# Altium footprint library Miscellaneous Connectors.PcbLib: 245 footprints (part 8 of 16)
Each footprint in its own frame and in the unit in brackets; x right, y up, seen from the top. Pads: shape width x height; smd on the part's side, far side on the other; paste and mask are expansions set on the pad; w line width, h text height; cw(c..) or ccw(c..) is an arc to the next point about the centre after c.
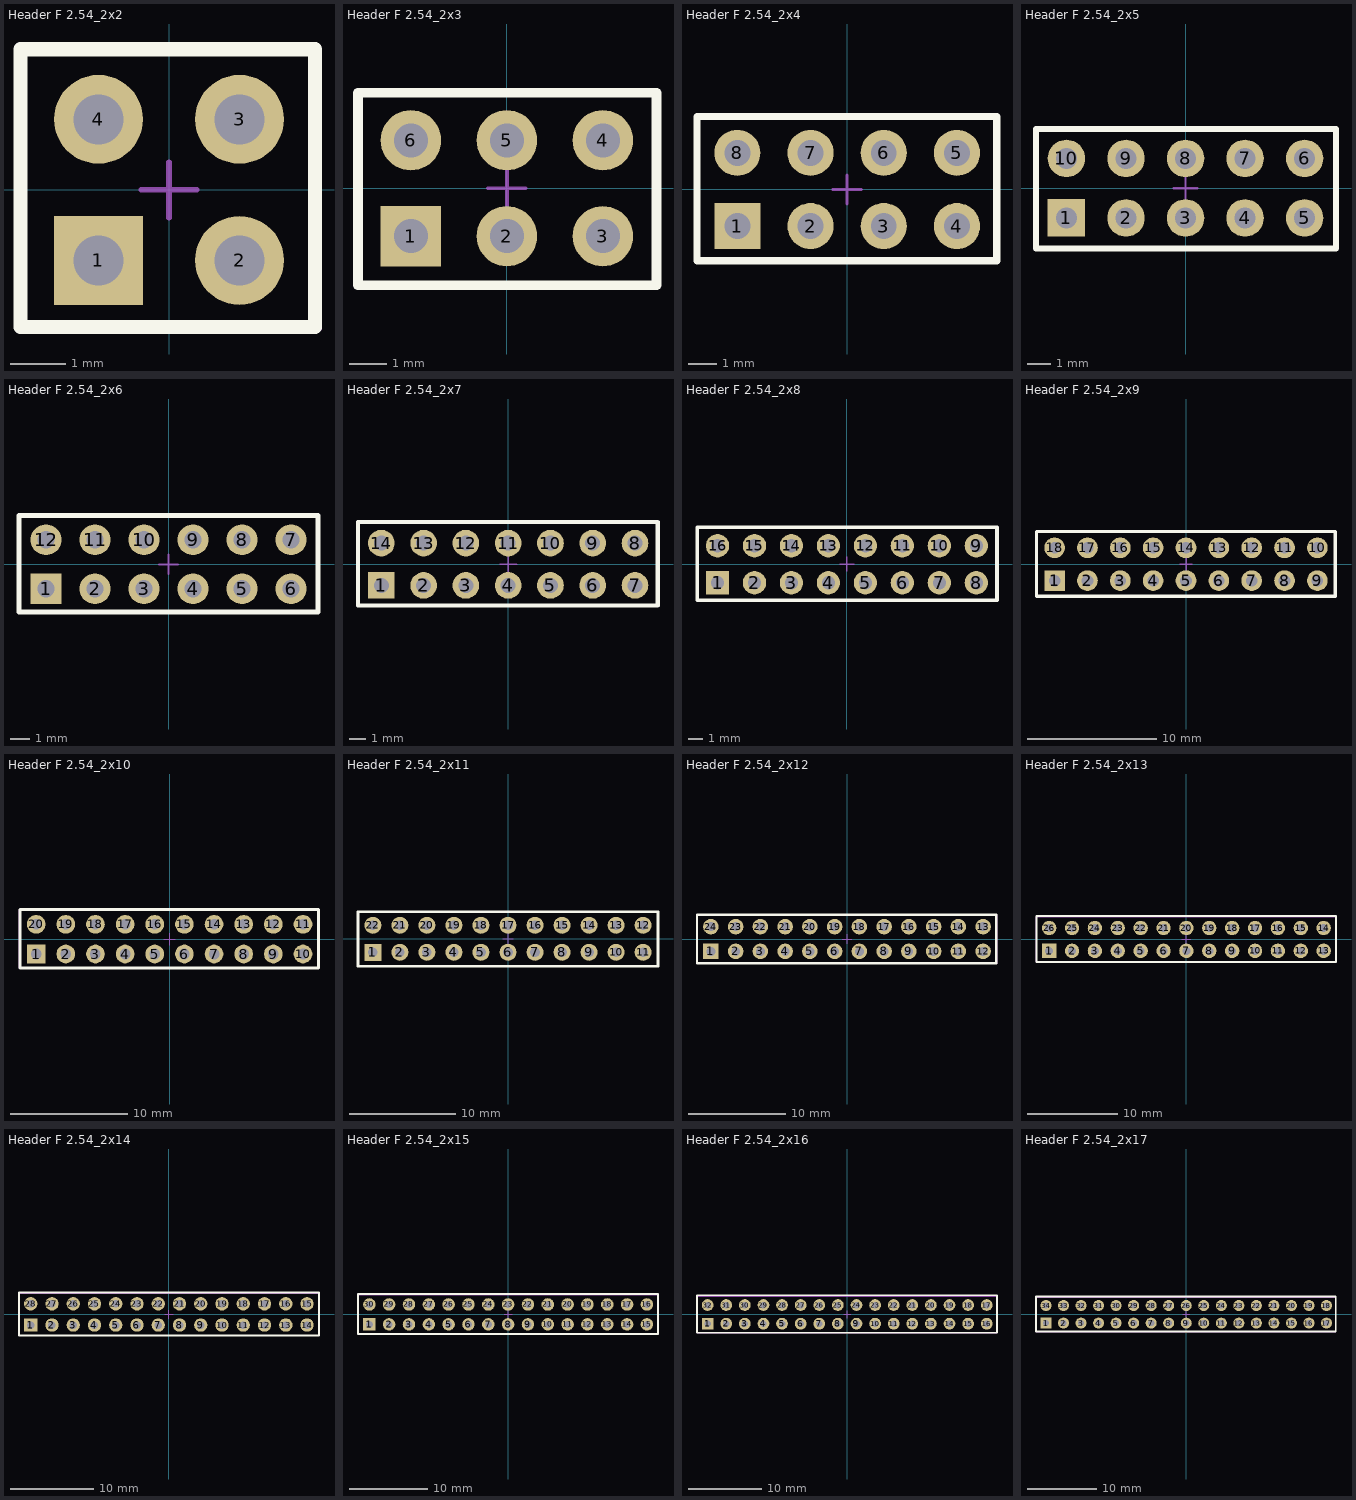
[diagram p7: the footprints below, top view; thin cyan lines are the x and y axes]

## Header F 2.54_2x2 [mm]
pads (4):
  rect 1.6x1.6 hole 0.9: 1(-1.27,-1.27)
  round 1.6 hole 0.9: 2(1.27,-1.27) 3(1.27,1.27) 4(-1.27,1.27)
Top Overlay:
  lines w0.254: -2.67,-2.47 2.63,-2.47 2.63,2.53 -2.67,2.53 -2.67,-2.47
Mechanical 15:
  lines w0.1: -0.5,0 0.5,0 ; 0,-0.5 0,0.5 ; -2.7,-2.5 2.7,-2.5 2.7,2.5 -2.7,2.5 -2.7,-2.5
3D body: height 8.6, standoff -3.1, extent -2.67,-2.47 2.66,2.53

## Header F 2.54_2x3 [mm]
pads (6):
  rect 1.6x1.6 hole 0.9: 1(-2.54,-1.27)
  round 1.6 hole 0.9: 2(0,-1.27) 3(2.54,-1.27) 4(2.54,1.27) 5(0,1.27) 6(-2.54,1.27)
Top Overlay:
  lines w0.254: -3.94,-2.57 3.96,-2.57 3.96,2.53 -3.94,2.53 -3.94,-2.57
Mechanical 15:
  lines w0.1: -0.5,0 0.5,0 ; 0,-0.5 0,0.5 ; -3.9,-2.5 -3.9,2.5 4,2.5 4,-2.5 -3.9,-2.5
3D body: height 8.6, standoff -3.1, extent -3.91,-2.5 3.96,2.5

## Header F 2.54_2x4 [mm]
pads (8):
  rect 1.6x1.6 hole 0.9: 1(-3.81,-1.27)
  round 1.6 hole 0.9: 2(-1.27,-1.27) 3(1.27,-1.27) 4(3.81,-1.27) 5(3.81,1.27) 6(1.27,1.27) 7(-1.27,1.27) 8(-3.81,1.27)
Top Overlay:
  lines w0.254: -5.21,-2.47 5.19,-2.47 5.19,2.53 -5.21,2.53 -5.21,-2.47
Mechanical 15:
  lines w0.1: -0.5,0 0.5,0 ; 0,-0.5 0,0.5 ; -5.2,-2.5 5.2,-2.5 5.2,2.5 -5.2,2.5 -5.2,-2.5
3D body: height 8.6, standoff -3.1, extent -5.21,-2.47 5.2,2.53

## Header F 2.54_2x5 [mm]
pads (10):
  rect 1.6x1.6 hole 0.9: 1(-5.08,-1.27)
  round 1.6 hole 0.9: 2(-2.54,-1.27) 3(0,-1.27) 4(2.54,-1.27) 5(5.08,-1.27) 6(5.08,1.27) 7(2.54,1.27) 8(0,1.27) 9(-2.54,1.27) 10(-5.08,1.27)
Top Overlay:
  lines w0.254: -6.38,-2.57 6.42,-2.57 6.42,2.53 -6.38,2.53 -6.38,-2.57
Mechanical 15:
  lines w0.1: -0.5,0 0.5,0 ; 0,-0.5 0,0.5 ; -6.3,-2.6 6.4,-2.6 6.4,2.5 -6.3,2.5 -6.3,-2.6
3D body: height 8.6, standoff -2.9, extent -6.33,-2.55 6.37,2.53

## Header F 2.54_2x6 [mm]
pads (12):
  rect 1.6x1.6 hole 0.9: 1(-6.35,-1.27)
  round 1.6 hole 0.9: 2(-3.81,-1.27) 3(-1.27,-1.27) 4(1.27,-1.27) 5(3.81,-1.27) 6(6.35,-1.27) 7(6.35,1.27) 8(3.81,1.27) 9(1.27,1.27) 10(-1.27,1.27) 11(-3.81,1.27) 12(-6.35,1.27)
Top Overlay:
  lines w0.254: -7.75,-2.47 7.75,-2.47 7.75,2.53 -7.75,2.53 -7.75,-2.47
Mechanical 15:
  lines w0.1: -0.5,0 0.5,0 ; 0,-0.5 0,0.5 ; -7.7,-2.5 7.8,-2.5 7.8,2.5 -7.7,2.5 -7.7,-2.5
3D body: height 8.6, standoff -3.1, extent -7.72,-2.5 7.77,2.5

## Header F 2.54_2x7 [mm]
pads (14):
  rect 1.6x1.6 hole 0.9: 1(-7.62,-1.27)
  round 1.6 hole 0.9: 2(-5.08,-1.27) 3(-2.54,-1.27) 4(0,-1.27) 5(2.54,-1.27) 6(5.08,-1.27) 7(7.62,-1.27) 8(7.62,1.27) 9(5.08,1.27) 10(2.54,1.27) 11(0,1.27) 12(-2.54,1.27) 13(-5.08,1.27) 14(-7.62,1.27)
Top Overlay:
  lines w0.254: -9.02,-2.47 8.98,-2.47 8.98,2.53 -9.02,2.53 -9.02,-2.47
Mechanical 15:
  lines w0.1: -0.5,0 0.5,0 ; 0,-0.5 0,0.5 ; -9,-2.5 9,-2.5 9,2.5 -9,2.5 -9,-2.5
3D body: height 8.6, standoff -3.1, extent -9.02,-2.47 9.01,2.53

## Header F 2.54_2x8 [mm]
pads (16):
  rect 1.6x1.6 hole 0.9: 1(-8.89,-1.27)
  round 1.6 hole 0.9: 2(-6.35,-1.27) 3(-3.81,-1.27) 4(-1.27,-1.27) 5(1.27,-1.27) 6(3.81,-1.27) 7(6.35,-1.27) 8(8.89,-1.27) 9(8.89,1.27) 10(6.35,1.27) 11(3.81,1.27) 12(1.27,1.27) 13(-1.27,1.27) 14(-3.81,1.27) 15(-6.35,1.27) 16(-8.89,1.27)
Top Overlay:
  lines w0.254: -10.29,-2.47 10.31,-2.47 10.31,2.53 -10.29,2.53 -10.29,-2.47
Mechanical 15:
  lines w0.1: -0.5,0 0.5,0 ; 0,-0.5 0,0.5 ; -10.3,-2.5 10.3,-2.5 10.3,2.5 -10.3,2.5 -10.3,-2.5
3D body: height 8.6, standoff -3.1, extent -10.275,-2.47 10.295,2.53

## Header F 2.54_2x9 [mm]
pads (18):
  rect 1.6x1.6 hole 0.9: 1(-10.16,-1.27)
  round 1.6 hole 0.9: 2(-7.62,-1.27) 3(-5.08,-1.27) 4(-2.54,-1.27) 5(0,-1.27) 6(2.54,-1.27) 7(5.08,-1.27) 8(7.62,-1.27) 9(10.16,-1.27) 10(10.16,1.27) 11(7.62,1.27) 12(5.08,1.27) 13(2.54,1.27) 14(0,1.27) 15(-2.54,1.27) 16(-5.08,1.27) 17(-7.62,1.27) 18(-10.16,1.27)
Top Overlay:
  lines w0.254: -11.56,-2.47 11.54,-2.47 11.54,2.53 -11.56,2.53 -11.56,-2.47
Mechanical 15:
  lines w0.1: -0.5,0 0.5,0 ; 0,-0.5 0,0.5 ; -11.6,-2.5 11.6,-2.5 11.6,2.5 -11.6,2.5 -11.6,-2.5
3D body: height 8.6, standoff -3.1, extent -11.53,-2.5 11.58,2.5

## Header F 2.54_2x10 [mm]
pads (20):
  rect 1.6x1.6 hole 0.9: 1(-11.43,-1.27)
  round 1.6 hole 0.9: 2(-8.89,-1.27) 3(-6.35,-1.27) 4(-3.81,-1.27) 5(-1.27,-1.27) 6(1.27,-1.27) 7(3.81,-1.27) 8(6.35,-1.27) 9(8.89,-1.27) 10(11.43,-1.27) 11(11.43,1.27) 12(8.89,1.27) 13(6.35,1.27) 14(3.81,1.27) 15(1.27,1.27) 16(-1.27,1.27) 17(-3.81,1.27) 18(-6.35,1.27) 19(-8.89,1.27) 20(-11.43,1.27)
Top Overlay:
  lines w0.254: -12.83,-2.47 12.77,-2.47 12.77,2.53 -12.83,2.53 -12.83,-2.47
Mechanical 15:
  lines w0.1: -0.5,0 0.5,0 ; 0,-0.5 0,0.5 ; -12.9,-2.5 12.8,-2.5 12.8,2.5 -12.9,2.5 -12.9,-2.5
3D body: height 8.6, standoff -3.1, extent -12.855,-2.52 12.795,2.48

## Header F 2.54_2x11 [mm]
pads (22):
  rect 1.6x1.6 hole 0.9: 1(-12.7,-1.27)
  round 1.6 hole 0.9: 2(-10.16,-1.27) 3(-7.62,-1.27) 4(-5.08,-1.27) 5(-2.54,-1.27) 6(0,-1.27) 7(2.54,-1.27) 8(5.08,-1.27) 9(7.62,-1.27) 10(10.16,-1.27) 11(12.7,-1.27) 12(12.7,1.27) 13(10.16,1.27) 14(7.62,1.27) 15(5.08,1.27) 16(2.54,1.27) 17(0,1.27) 18(-2.54,1.27) 19(-5.08,1.27) 20(-7.62,1.27) 21(-10.16,1.27) 22(-12.7,1.27)
Top Overlay:
  lines w0.254: -14.1,-2.57 -14.1,2.53 14.1,2.53 14.1,-2.57 -14.1,-2.57
Mechanical 15:
  lines w0.1: -0.5,0 0.5,0 ; 0,-0.5 0,0.5 ; -14.1,-2.5 -14.1,2.5 14.1,2.5 14.1,-2.5 -14.1,-2.5
3D body: height 8.6, standoff -3.1, extent -14.12,-2.5 14.07,2.5

## Header F 2.54_2x12 [mm]
pads (24):
  rect 1.6x1.6 hole 0.9: 1(-13.97,-1.27)
  round 1.6 hole 0.9: 2(-11.43,-1.27) 3(-8.89,-1.27) 4(-6.35,-1.27) 5(-3.81,-1.27) 6(-1.27,-1.27) 7(1.27,-1.27) 8(3.81,-1.27) 9(6.35,-1.27) 10(8.89,-1.27) 11(11.43,-1.27) 12(13.97,-1.27) 13(13.97,1.27) 14(11.43,1.27) 15(8.89,1.27) 16(6.35,1.27) 17(3.81,1.27) 18(1.27,1.27) 19(-1.27,1.27) 20(-3.81,1.27) 21(-6.35,1.27) 22(-8.89,1.27) 23(-11.43,1.27) 24(-13.97,1.27)
Top Overlay:
  lines w0.254: -15.4,-2.5 15.3,-2.5 15.3,2.5 -15.4,2.5 -15.4,-2.5
Mechanical 15:
  lines w0.1: -0.5,0 0.5,0 ; 0,-0.5 0,0.5 ; -15.4,-2.5 15.4,-2.5 15.4,2.5 -15.4,2.5 -15.4,-2.5
3D body: height 8.6, standoff -3.1, extent -15.385,-2.47 15.345,2.53

## Header F 2.54_2x13 [mm]
pads (26):
  rect 1.6x1.6 hole 0.9: 1(-15.24,-1.27)
  round 1.6 hole 0.9: 2(-12.7,-1.27) 3(-10.16,-1.27) 4(-7.62,-1.27) 5(-5.08,-1.27) 6(-2.54,-1.27) 7(0,-1.27) 8(2.54,-1.27) 9(5.08,-1.27) 10(7.62,-1.27) 11(10.16,-1.27) 12(12.7,-1.27) 13(15.24,-1.27) 14(15.24,1.27) 15(12.7,1.27) 16(10.16,1.27) 17(7.62,1.27) 18(5.08,1.27) 19(2.54,1.27) 20(0,1.27) 21(-2.54,1.27) 22(-5.08,1.27) 23(-7.62,1.27) 24(-10.16,1.27) 25(-12.7,1.27) 26(-15.24,1.27)
Top Overlay:
  lines w0.254: -16.64,-2.5 16.61,-2.5 16.61,2.6 -16.64,2.6 -16.64,-2.5
Mechanical 15:
  lines w0.1: -0.5,0 0.5,0 ; 0,-0.5 0,0.5 ; -16.7,-2.5 16.6,-2.5 16.6,2.5 -16.7,2.5 -16.7,-2.5
3D body: height 8.6, standoff -3.1, extent -16.64,-2.47 16.63,2.53

## Header F 2.54_2x14 [mm]
pads (28):
  rect 1.6x1.6 hole 0.9: 1(-16.51,-1.27)
  round 1.6 hole 0.9: 2(-13.97,-1.27) 3(-11.43,-1.27) 4(-8.89,-1.27) 5(-6.35,-1.27) 6(-3.81,-1.27) 7(-1.27,-1.27) 8(1.27,-1.27) 9(3.81,-1.27) 10(6.35,-1.27) 11(8.89,-1.27) 12(11.43,-1.27) 13(13.97,-1.27) 14(16.51,-1.27) 15(16.51,1.27) 16(13.97,1.27) 17(11.43,1.27) 18(8.89,1.27) 19(6.35,1.27) 20(3.81,1.27) 21(1.27,1.27) 22(-1.27,1.27) 23(-3.81,1.27) 24(-6.35,1.27) 25(-8.89,1.27) 26(-11.43,1.27) 27(-13.97,1.27) 28(-16.51,1.27)
Top Overlay:
  lines w0.254: -17.91,-2.5 17.94,-2.5 17.94,2.6 -17.91,2.6 -17.91,-2.5
Mechanical 15:
  lines w0.1: -0.5,0 0.5,0 ; 0,-0.5 0,0.5 ; -17.9,-2.5 17.9,-2.5 17.9,2.5 -17.9,2.5 -17.9,-2.5
3D body: height 8.6, standoff -3.1, extent -17.915,-2.47 17.895,2.53

## Header F 2.54_2x15 [mm]
pads (30):
  rect 1.6x1.6 hole 0.9: 1(-17.78,-1.27)
  round 1.6 hole 0.9: 2(-15.24,-1.27) 3(-12.7,-1.27) 4(-10.16,-1.27) 5(-7.62,-1.27) 6(-5.08,-1.27) 7(-2.54,-1.27) 8(0,-1.27) 9(2.54,-1.27) 10(5.08,-1.27) 11(7.62,-1.27) 12(10.16,-1.27) 13(12.7,-1.27) 14(15.24,-1.27) 15(17.78,-1.27) 16(17.78,1.27) 17(15.24,1.27) 18(12.7,1.27) 19(10.16,1.27) 20(7.62,1.27) 21(5.08,1.27) 22(2.54,1.27) 23(0,1.27) 24(-2.54,1.27) 25(-5.08,1.27) 26(-7.62,1.27) 27(-10.16,1.27) 28(-12.7,1.27) 29(-15.24,1.27) 30(-17.78,1.27)
Top Overlay:
  lines w0.254: -19.23,-2.5 19.17,-2.5 19.17,2.6 -19.23,2.6 -19.23,-2.5
Mechanical 15:
  lines w0.1: -0.5,0 0.5,0 ; 0,-0.5 0,0.5 ; -19.2,-2.5 19.2,-2.5 19.2,2.5 -19.2,2.5 -19.2,-2.5
3D body: height 8.6, standoff -3.1, extent -19.2,-2.5 19.15,2.5

## Header F 2.54_2x16 [mm]
pads (32):
  rect 1.6x1.6 hole 0.9: 1(-19.05,-1.27)
  round 1.6 hole 0.9: 2(-16.51,-1.27) 3(-13.97,-1.27) 4(-11.43,-1.27) 5(-8.89,-1.27) 6(-6.35,-1.27) 7(-3.81,-1.27) 8(-1.27,-1.27) 9(1.27,-1.27) 10(3.81,-1.27) 11(6.35,-1.27) 12(8.89,-1.27) 13(11.43,-1.27) 14(13.97,-1.27) 15(16.51,-1.27) 16(19.05,-1.27) 17(19.05,1.27) 18(16.51,1.27) 19(13.97,1.27) 20(11.43,1.27) 21(8.89,1.27) 22(6.35,1.27) 23(3.81,1.27) 24(1.27,1.27) 25(-1.27,1.27) 26(-3.81,1.27) 27(-6.35,1.27) 28(-8.89,1.27) 29(-11.43,1.27) 30(-13.97,1.27) 31(-16.51,1.27) 32(-19.05,1.27)
Top Overlay:
  lines w0.254: -20.5,-2.5 -20.5,2.6 20.45,2.6 20.45,-2.5 -20.5,-2.5
Mechanical 15:
  lines w0.1: -0.5,0 0.5,0 ; 0,-0.5 0,0.5 ; -20.5,-2.5 -20.5,2.5 20.4,2.5 20.4,-2.5 -20.5,-2.5
3D body: height 8.6, standoff -3.1, extent -20.47,-2.5 20.42,2.5

## Header F 2.54_2x17 [mm]
pads (34):
  rect 1.6x1.6 hole 0.9: 1(-20.32,-1.27)
  round 1.6 hole 0.9: 2(-17.78,-1.27) 3(-15.24,-1.27) 4(-12.7,-1.27) 5(-10.16,-1.27) 6(-7.62,-1.27) 7(-5.08,-1.27) 8(-2.54,-1.27) 9(0,-1.27) 10(2.54,-1.27) 11(5.08,-1.27) 12(7.62,-1.27) 13(10.16,-1.27) 14(12.7,-1.27) 15(15.24,-1.27) 16(17.78,-1.27) 17(20.32,-1.27) 18(20.32,1.27) 19(17.78,1.27) 20(15.24,1.27) 21(12.7,1.27) 22(10.16,1.27) 23(7.62,1.27) 24(5.08,1.27) 25(2.54,1.27) 26(0,1.27) 27(-2.54,1.27) 28(-5.08,1.27) 29(-7.62,1.27) 30(-10.16,1.27) 31(-12.7,1.27) 32(-15.24,1.27) 33(-17.78,1.27) 34(-20.32,1.27)
Top Overlay:
  lines w0.254: -21.77,-2.5 21.68,-2.5 21.68,2.6 -21.77,2.6 -21.77,-2.5
Mechanical 15:
  lines w0.1: -0.5,0 0.5,0 ; 0,-0.5 0,0.5 ; -21.7,-2.5 21.7,-2.5 21.7,2.5 -21.7,2.5 -21.7,-2.5
3D body: height 8.6, standoff -3.1, extent -21.74,-2.5 21.69,2.5